# Altium footprint library FootPrintLib_12.PcbLib: 319 footprints (part 13 of 20)
Each footprint in its own frame and in the unit in brackets; x right, y up, seen from the top. Pads: shape width x height; smd on the part's side, far side on the other; paste and mask are expansions set on the pad; w line width, h text height; cw(c..) or ccw(c..) is an arc to the next point about the centre after c.
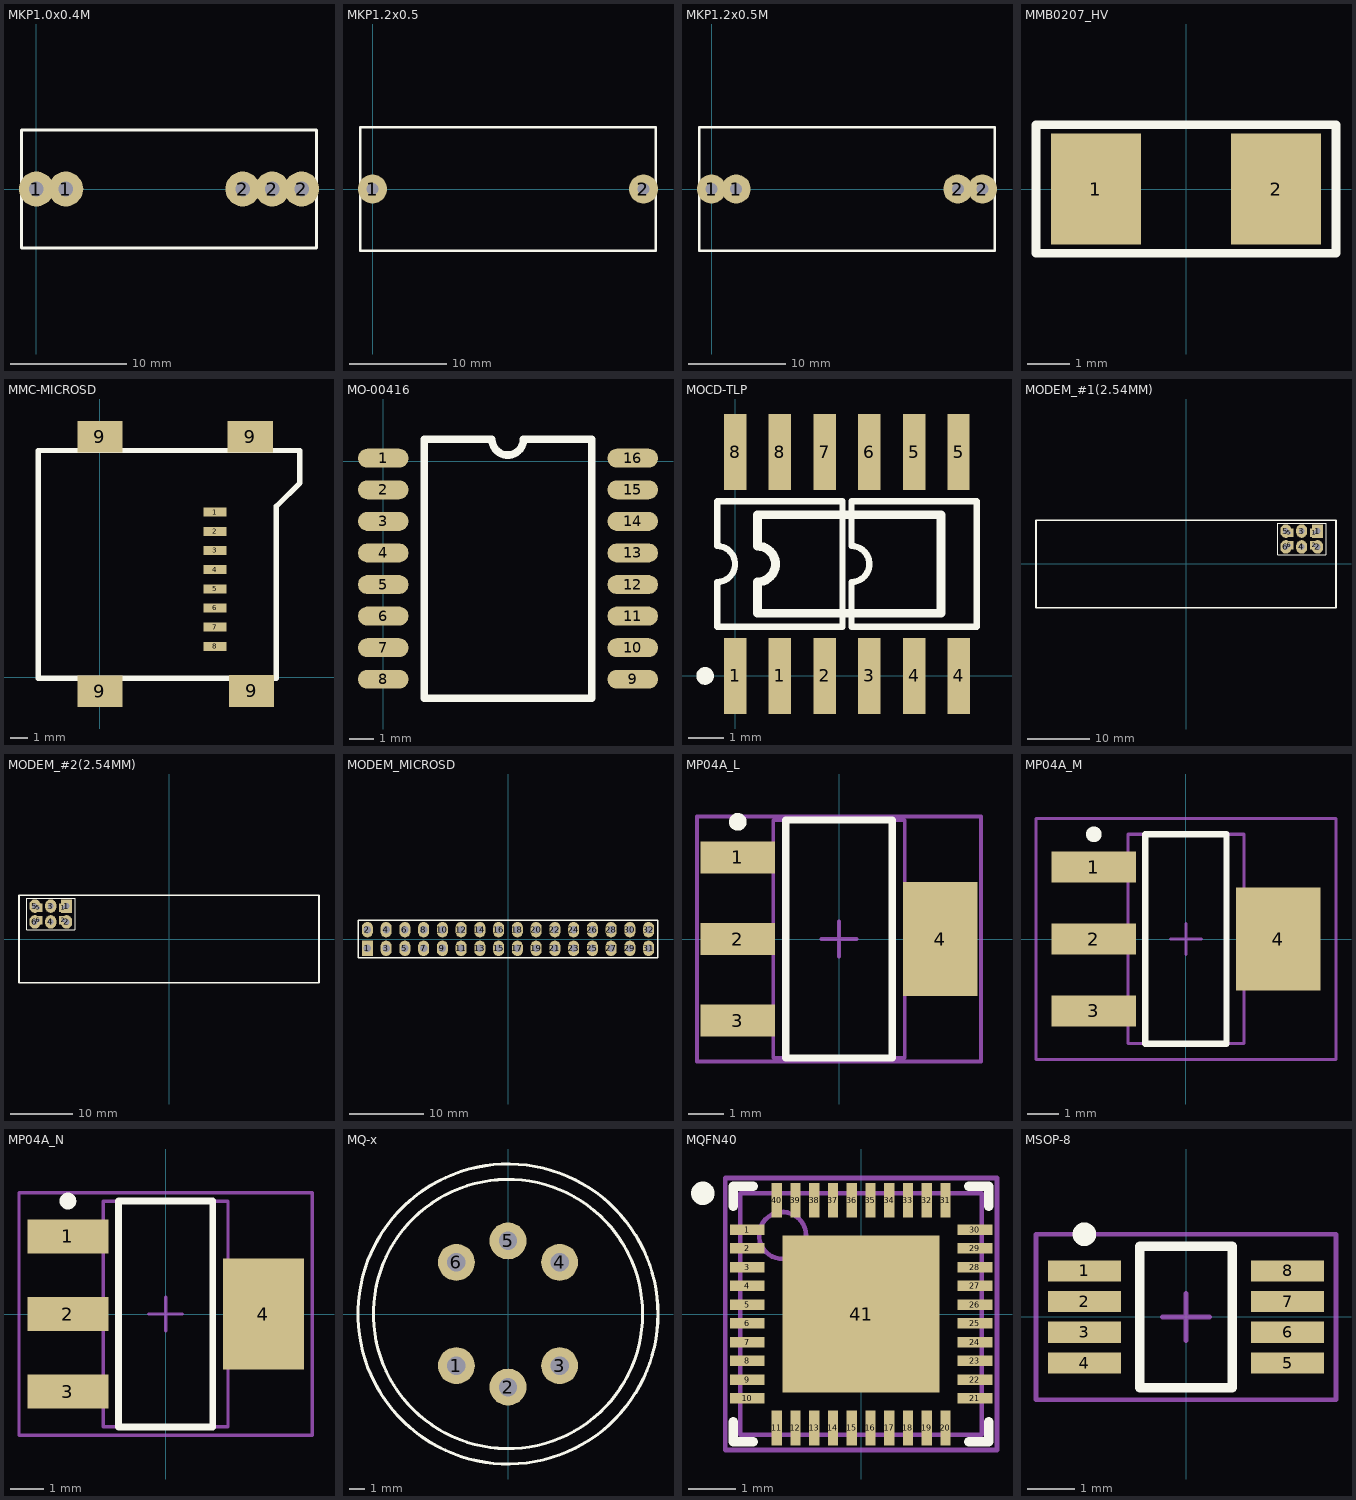
[diagram p12: the footprints below, top view; thin cyan lines are the x and y axes]

## MKP1.0x0.4M [mm]
pads (5):
  round 3 hole 1.25: 1(0,0) 1(2.54,0) 2(17.78,0) 2(20.32,0) 2(22.86,0)
Top Overlay:
  lines w0.254: -1.27,-5.08 24.13,-5.08 24.13,5.08 -1.27,5.08 -1.27,-5.08

## MKP1.2x0.5 [mm]
pads (2):
  round 3 hole 1.25: 1(0,0) 2(27.94,0)
Top Overlay:
  lines w0.254: -1.27,-6.35 29.21,-6.35 29.21,6.35 -1.27,6.35 -1.27,-6.35

## MKP1.2x0.5M [mm]
pads (4):
  round 3 hole 1.25: 1(0,0) 1(2.54,0) 2(25.4,0) 2(27.94,0)
Top Overlay:
  lines w0.254: -1.27,-6.35 -1.27,6.35 29.21,6.35 29.21,-6.35 -1.27,-6.35

## MMB0207_HV [mm]
height 1.5
pads (2):
  rect 2.1x2.6 smd: 1(-2.1,0) 2(2.1,0)
Top Overlay:
  lines w0.2: -3.5,-1.5 3.5,-1.5 ; -3.5,1.5 3.5,1.5
  lines w0.203: -3.5,-1.5 -3.5,1.5 ; 3.5,-1.5 3.5,1.5
3D body "User Library-1206(3216M) Res.STEP": height 1.53, standoff 0, extent -2,-0.8 2,0.8

## MMC-MICROSD [mil]
pads (12):
  rect 50x20 smd: 1(255,365.5) 2(255,323) 3(255,280.5) 4(255,238) 5(255,195.5) 6(255,153) 7(255,110.5) 8(255,68)
  rect 100x70 smd: 9(0,-32) 9(0,533) 9(333,533) 9(336,-31)
Top Overlay:
  lines w12: -137,-3 -137,502 443,502 443,430.5 391,378.5 391,-3 -137,-3

## MO-00416 [mil]
pads (16):
  oval 80x30 smd: 1(0,5) 2(0,-45) 3(0,-95) 4(0,-145) 5(0,-195) 6(0,-245) 7(0,-295) 8(0,-345) 9(395,-345) 10(395,-295) 11(395,-245) 12(395,-195) 13(395,-145) 14(395,-95) 15(395,-45) 16(395,5)
Top Overlay:
  lines w12: 65,-375 330,-375 330,35 222,35 cw(c197,35) 172,35 65,35 65,-375

## MOCD-TLP [mil]
pads (12):
  rect 25x85 smd: 1(0,0) 1(50,0) 2(100,0) 3(150,0) 4(200,0) 4(250,0) 5(200,250) 5(249.55,250) 6(150,250) 7(100,250) 8(0,250) 8(50,250)
Top Overlay:
  circle w9.84: c-33.46,0 r4.92
  lines w7: -20,104.9 ccw(c-20,124.95) -20,145 -20,195 120,195 120,55 -20,55 -20,105 ; 130,104.9 ccw(c130,124.95) 130,145 130,195 270,195 270,55 130,55 130,105
  lines w10: 25,104.9 ccw(c25,124.95) 25,145 25,180 230,180 230,70 25,70 25,105

## MODEM_#1(2.54MM) [mm] "Connector; Header; 3x2 Position"
pads (10):
  rect 1.3x1.3 hole 0.5: 1(20.511,5) 2(20.511,3) 5(16.511,5) 6(16.511,3)
  rect 1.778x2.159 hole 0.9: 1(21.051,5.27)
  oval 1.778x2.159 hole 0.9: 2(21.051,2.73) 3(18.511,5.27) 4(18.511,2.73) 5(15.971,5.27) 6(15.971,2.73)
Top Overlay:
  lines w0.2: 19.569,6.54 14.701,6.54 ; 14.701,6.54 22.321,6.54 22.321,1.46 14.701,1.46 14.701,6.54
  lines w0.254: -24,-7 24,-7 24,7 -24,7 -24,-7
3D body "User Library-DS1023-2x3S01.STEP": height 8.5, standoff -3, extent 14.471,1.52 22.591,6.6

## MODEM_#2(2.54MM) [mm] "Connector; Header; 3x2 Position"
pads (10):
  rect 1.3x1.3 hole 0.5: 1(-16.92,5) 2(-16.92,3) 5(-20.92,5) 6(-20.92,3)
  rect 1.778x2.159 hole 0.9: 1(-16.38,5.27)
  oval 1.778x2.159 hole 0.9: 2(-16.38,2.73) 3(-18.92,5.27) 4(-18.92,2.73) 5(-21.46,5.27) 6(-21.46,2.73)
Top Overlay:
  lines w0.2: -17.862,6.54 -22.73,6.54 ; -22.73,6.54 -15.11,6.54 -15.11,1.46 -22.73,1.46 -22.73,6.54
  lines w0.254: -24,-7 24,-7 24,7 -24,7 -24,-7
3D body "User Library-DS1023-2x3S01.STEP": height 8.5, standoff -3, extent -22.96,1.52 -14.84,6.6

## MODEM_MICROSD [mm] "Connector; Header; 2x16 Position"
height 8.5
pads (32):
  rect 1.5x2.1 / inner rect 1.7x2.1 / far side rect 1.7x2.1 hole 1: 1(-19.05,-1.27)
  oval 1.5x2.1 / inner oval 1.7x2.1 / far side oval 1.7x2.1 hole 1: 2(-19.05,1.27) 3(-16.51,-1.27) 4(-16.51,1.27) 5(-13.97,-1.27) 6(-13.97,1.27) 7(-11.43,-1.27) 8(-11.43,1.27) 9(-8.89,-1.27) 10(-8.89,1.27) 11(-6.35,-1.27) 12(-6.35,1.27) 13(-3.81,-1.27) 14(-3.81,1.27) 15(-1.27,-1.27) 16(-1.27,1.27) 17(1.27,-1.27) 18(1.27,1.27) 19(3.81,-1.27) 20(3.81,1.27) 21(6.35,-1.27) 22(6.35,1.27) 23(8.89,-1.27) 24(8.89,1.27) 25(11.43,-1.27) 26(11.43,1.27) 27(13.97,-1.27) 28(13.97,1.27) 29(16.51,-1.27) 30(16.51,1.27) 31(19.05,-1.27) 32(19.05,1.27)
Top Overlay:
  lines w0.2: -20.32,-2.54 20.32,-2.54 20.32,2.54 -20.32,2.54 -20.32,-2.54
3D body "User Library-DS1023-2x3S01.STEP": height 8.5, standoff -3, extent -12.97,-2.6 -4.85,2.48
3D body "User Library-DS1023-2x3S01.STEP": height 8.5, standoff -3, extent -20.59,-2.6 -12.47,2.48
3D body "User Library-DS1023-2x3S01.STEP": height 8.5, standoff -3, extent -5.35,-2.6 2.77,2.48
3D body "User Library-DS1023-2x3S01.STEP": height 8.5, standoff -3, extent 2.27,-2.6 10.39,2.48
3D body "User Library-DS1023-2x3S01.STEP": height 8.5, standoff -3, extent 9.89,-2.6 18.01,2.48
3D body "User Library-DS1023-2x3S01.STEP": height 8.5, standoff -3, extent 12.43,-2.6 20.55,2.48

## MP04A_L [mm] "SOT223, 4-Leads, Body 6.5x3.5mm, Pitch 2.3mm, Lead Span 7mm, IPC High Density"
height 1.8
pads (4):
  rect 2.1x0.9 smd: 1(-2.85,2.3) 2(-2.85,0) 3(-2.85,-2.3)
  rect 2.1x3.2 smd: 4(2.85,0)
Top Overlay:
  circle w0.25: c-2.85,3.3 r0.125
  lines w0.2: -1.5,-3.35 -1.5,3.35 1.5,3.35 1.5,-3.35 -1.5,-3.35
Mechanical 13:
  lines w0.1: -1.85,-3.35 -1.85,3.35 1.85,3.35 1.85,-3.35 -1.85,-3.35
Mechanical 15:
  lines w0.1: -0.5,0 0.5,0 ; 0,-0.5 0,0.5 ; -4,-3.45 -4,3.45 4,3.45 4,-3.45 -4,-3.45
3D body "TO-223.STEP": height 1.64, standoff -0.04, extent -3.49,-3.242 3.49,3.242

## MP04A_M [mm] "SOT223, 4-Leads, Body 6.5x3.5mm, Pitch 2.3mm, Lead Span 7mm, IPC Low Density"
height 1.8
pads (4):
  rect 2.7x1 smd: 1(-2.95,2.3) 2(-2.95,0) 3(-2.95,-2.3)
  rect 2.7x3.3 smd: 4(2.95,0)
Top Overlay:
  circle w0.25: c-2.95,3.35 r0.125
  lines w0.2: -1.3,-3.35 -1.3,3.35 1.3,3.35 1.3,-3.35 -1.3,-3.35
Mechanical 13:
  lines w0.1: -1.85,-3.35 -1.85,3.35 1.85,3.35 1.85,-3.35 -1.85,-3.35
Mechanical 15:
  lines w0.1: -0.5,0 0.5,0 ; 0,-0.5 0,0.5 ; -4.8,-3.85 -4.8,3.85 4.8,3.85 4.8,-3.85 -4.8,-3.85
3D body "TO-223.STEP": height 1.64, standoff -0.04, extent -3.49,-3.242 3.49,3.242

## MP04A_N [mm] "SOT223, 4-Leads, Body 6.5x3.5mm, Pitch 2.3mm, Lead Span 7mm, IPC Medium Density"
height 1.8
pads (4):
  rect 2.4x1 smd: 1(-2.9,2.3) 2(-2.9,0) 3(-2.9,-2.3)
  rect 2.4x3.3 smd: 4(2.9,0)
Top Overlay:
  circle w0.25: c-2.9,3.35 r0.125
  lines w0.2: -1.4,-3.35 -1.4,3.35 1.4,3.35 1.4,-3.35 -1.4,-3.35
Mechanical 13:
  lines w0.1: -1.85,-3.35 -1.85,3.35 1.85,3.35 1.85,-3.35 -1.85,-3.35
Mechanical 15:
  lines w0.1: -0.5,0 0.5,0 ; 0,-0.5 0,0.5 ; -4.35,-3.6 -4.35,3.6 4.35,3.6 4.35,-3.6 -4.35,-3.6
3D body "TO-223.STEP": height 1.64, standoff -0.04, extent -3.49,-3.242 3.49,3.242

## MQ-x [mm] "Gas Sensor"
height 15
pads (6):
  round 2.4 hole 1.2: 1(-3.359,-3.359) 2(0,-4.75) 3(3.359,-3.359) 4(3.359,3.359) 5(0,4.75) 6(-3.359,3.359)
Top Overlay:
  circle w0.2: c0,0 r8.75
  circle w0.2: c0,0 r9.75
3D body "User Library-MQ-5.STEP": height 16.06, standoff -7, extent -9.5,-9.5 9.5,9.5

## MQFN40 [mm] "MQFN, 40-Leads, Body 5x5mm, Pitch 0.4mm, IPC Medium Density"
height 1
pads (41):
  rect 0.74x0.22 smd: 1(-2.43,1.8) 2(-2.43,1.4) 3(-2.43,1) 4(-2.43,0.6) 5(-2.43,0.2) 6(-2.43,-0.2) 7(-2.43,-0.6) 8(-2.43,-1) 9(-2.43,-1.4) 10(-2.43,-1.8) 21(2.43,-1.8) 22(2.43,-1.4) 23(2.43,-1) 24(2.43,-0.6) 25(2.43,-0.2) 26(2.43,0.2) 27(2.43,0.6) 28(2.43,1) 29(2.43,1.4) 30(2.43,1.8)
  rect 0.22x0.74 smd: 11(-1.8,-2.43) 12(-1.4,-2.43) 13(-1,-2.43) 14(-0.6,-2.43) 15(-0.2,-2.43) 16(0.2,-2.43) 17(0.6,-2.43) 18(1,-2.43) 19(1.4,-2.43) 20(1.8,-2.43) 31(1.8,2.43) 32(1.4,2.43) 33(1,2.43) 34(0.6,2.43) 35(0.2,2.43) 36(-0.2,2.43) 37(-0.6,2.43) 38(-1,2.43) 39(-1.4,2.43) 40(-1.8,2.43)
  rect 3.353x3.353 smd paste-2.54: 41(0,0)
Top Overlay:
  circle w0.25: c-3.375,2.575 r0.125
  lines w0.2: -2.725,-2.3 -2.725,-2.725 -2.3,-2.725 ; -2.725,2.3 -2.725,2.725 -2.3,2.725 ; 2.3,-2.725 2.725,-2.725 2.725,-2.3 ; 2.3,2.725 2.725,2.725 2.725,2.3
Top Paste:
  region: -0.15,-0.15 -0.15,-1.5 -1.5,-1.5 -1.5,-0.15
  region: 1.5,-0.15 1.5,-1.5 0.15,-1.5 0.15,-0.15
  region: 1.5,1.5 1.5,0.15 0.15,0.15 0.15,1.5
  region: -0.15,1.5 -0.15,0.15 -1.5,0.15 -1.5,1.5
Mechanical 13:
  circle w0.1: c-1.675,1.675 r0.5
  lines w0.1: -2.575,-2.575 2.575,-2.575 2.575,2.575 -2.575,2.575 -2.575,-2.575
Mechanical 15:
  lines w0.1: -0.5,0 0.5,0 ; 0,-0.5 0,0.5 ; -2.9,-2.9 2.9,-2.9 2.9,2.9 -2.9,2.9 -2.9,-2.9
3D body "User Library-QFN-40-5x5mm 0.4 Pitch.STEP": height 0.73, standoff -0.02, extent -2.501,-2.501 2.501,2.501

## MSOP-8 [mm] "TSOP, 8-Leads, Body 3.0x3.0mm (max), Pitch 0.65mm, IPC Medium Density"
height 1.1
pads (8):
  rect 1.55x0.45 smd: 1(-2.15,0.975) 2(-2.15,0.325) 3(-2.15,-0.325) 4(-2.15,-0.975) 5(2.15,-0.975) 6(2.15,-0.325) 7(2.15,0.325) 8(2.15,0.975)
Top Overlay:
  circle w0.25: c-2.15,1.75 r0.125
  lines w0.2: -0.975,-1.5 0.975,-1.5 0.975,1.5 -0.975,1.5 -0.975,-1.5
Mechanical 15:
  lines w0.1: -0.5,0 0.5,0 ; 0,-0.5 0,0.5 ; -3.175,-1.75 3.175,-1.75 3.175,1.75 -3.175,1.75 -3.175,-1.75
3D body "User Library-User Library-MSOP-8-1.STEP": height 0.92, standoff 0, extent -2.5,-1.5 2.5,1.5